# Altium footprint library TN1215600G.PcbLib: 1 footprints
Each footprint in its own frame and in the unit in brackets; x right, y up, seen from the top. Pads: shape width x height; smd on the part's side, far side on the other; paste and mask are expansions set on the pad; w line width, h text height; cw(c..) or ccw(c..) is an arc to the next point about the centre after c.
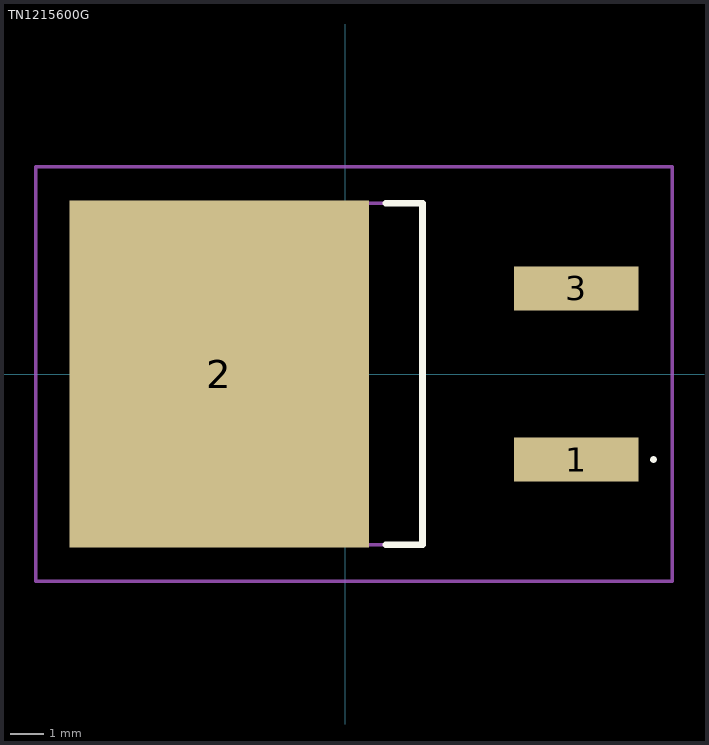
[diagram p0: the footprint, top view; thin cyan lines are the x and y axes]

## TN1215600G [mm]
pads (3):
  rect 3.7x1.3 smd: 1(6.857,-2.54) 3(6.857,2.54)
  rect 8.9x10.3 smd: 2(-3.742,0)
Top Overlay:
  lines w0.1: 9.1,-2.54 cw(c9.15,-2.54) 9.2,-2.54 ; 9.1,-2.54 9.1,-2.54 ; 9.1,-2.54 ccw(c9.15,-2.54) 9.2,-2.54 ; 9.2,-2.54 9.2,-2.54
  lines w0.2: 1.2,-5.07 2.293,-5.07 2.293,5.07 1.2,5.07
Mechanical 15:
  lines w0.1: -6.857,-5.07 2.293,-5.07 2.293,5.07 -6.857,5.07 -6.857,-5.07
Mechanical 20:
  lines w0.1: -9.193,-6.15 9.707,-6.15 9.707,6.15 -9.193,6.15 -9.193,-6.15